# Altium footprint library PcbLib1.PcbLib: 37 footprints (part 3 of 3)
Each footprint in its own frame and in the unit in brackets; x right, y up, seen from the top. Pads: shape width x height; smd on the part's side, far side on the other; paste and mask are expansions set on the pad; w line width, h text height; cw(c..) or ccw(c..) is an arc to the next point about the centre after c.
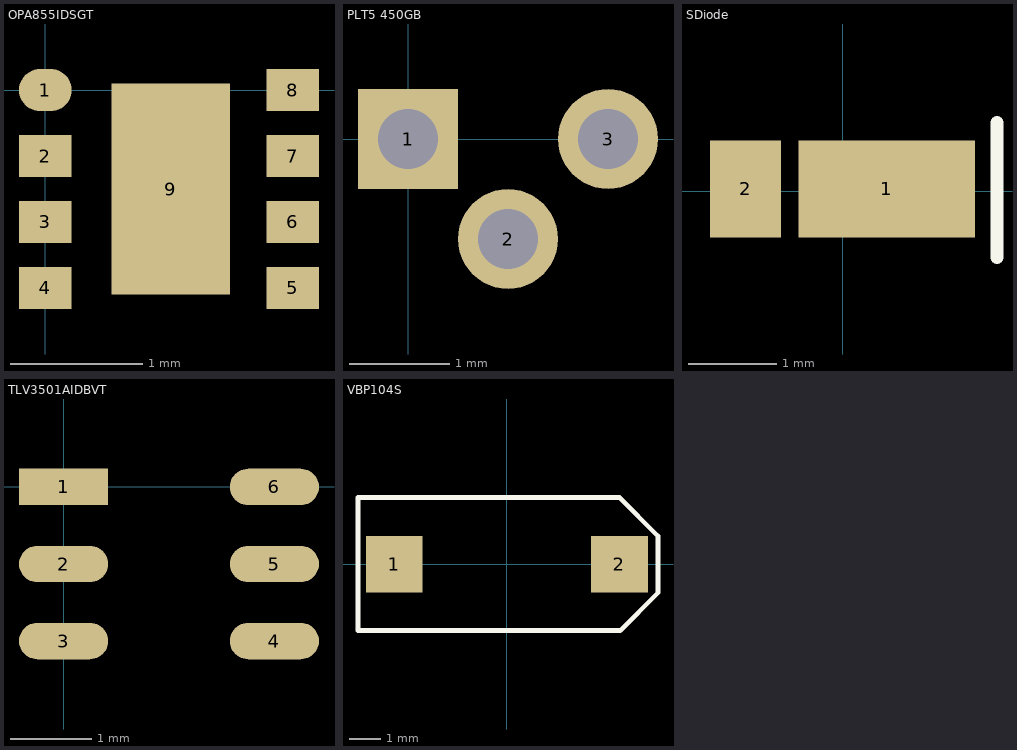
[diagram p2: the footprints below, top view; thin cyan lines are the x and y axes]

## OPA855IDSGT [mm]
pads (9):
  oval 0.4x0.32 smd: 1(0,0)
  rect 0.4x0.32 smd: 2(0,-0.5) 3(0,-1) 4(0,-1.5) 5(1.875,-1.5) 6(1.875,-1) 7(1.875,-0.5) 8(1.875,0)
  rect 0.9x1.6 smd: 9(0.95,-0.75)
3D body "OPA855IDSGT.stp": height 0.79, standoff 0.01, extent -0.05,-1.75 1.95,0.25

## PLT5 450GB [mm]
pads (3):
  rect 1x1 / inner rect 1.8x1.8 / far side rect 1x1 hole 0.6: 1(0,0)
  round 1 / inner rect 1.8x1.8 / far side round 1 hole 0.6: 2(1,-1) 3(2,0)
3D body "PLT5_450GB.stp": height 3.51, standoff -6.49, extent -1.775,-2.728 3.755,2.778

## SDiode [mm] "RB558VAM150TR"
pads (2):
  rect 2x1.1 smd: 1(0.5,0.025)
  rect 0.8x1.1 smd: 2(-1.1,0.025)
Top Overlay:
  lines w0.15: 1.75,-0.75 1.75,0.775
3D body "RB558VAM150TR.stp": height 0.61, standoff 0.01, extent -1.25,-0.7 1.25,0.7

## TLV3501AIDBVT [mm]
pads (6):
  rect 1.1x0.45 smd: 1(0,0)
  oval 1.1x0.45 smd: 2(0,-0.95) 3(0,-1.9) 4(2.6,-1.9) 5(2.6,-0.95) 6(2.6,0)
3D body "TLV3501AIDBVT.stp": height 1.11, standoff -0.09, extent 0,-2.4 2.8,0.5

## VBP104S [mm]
pads (2):
  rect 1.8x1.8 smd: 1(-3.575,0) 2(3.575,0)
Top Overlay:
  lines w0.15: -4.722,-2.1 -4.722,2.125 3.575,2.125 4.8,0.9 4.8,-0.9 3.6,-2.1 2.081,-2.1 -3.356,-2.1 -4.7,-2.1
3D body "VBPW34S.stp": height 1.31, standoff 0.01, extent -3.198,-1.938 3.202,1.962